# Altium footprint library Borisov.pcblib: 48 footprints (part 2 of 3)
Each footprint in its own frame and in the unit in brackets; x right, y up, seen from the top. Pads: shape width x height; smd on the part's side, far side on the other; paste and mask are expansions set on the pad; w line width, h text height; cw(c..) or ccw(c..) is an arc to the next point about the centre after c.
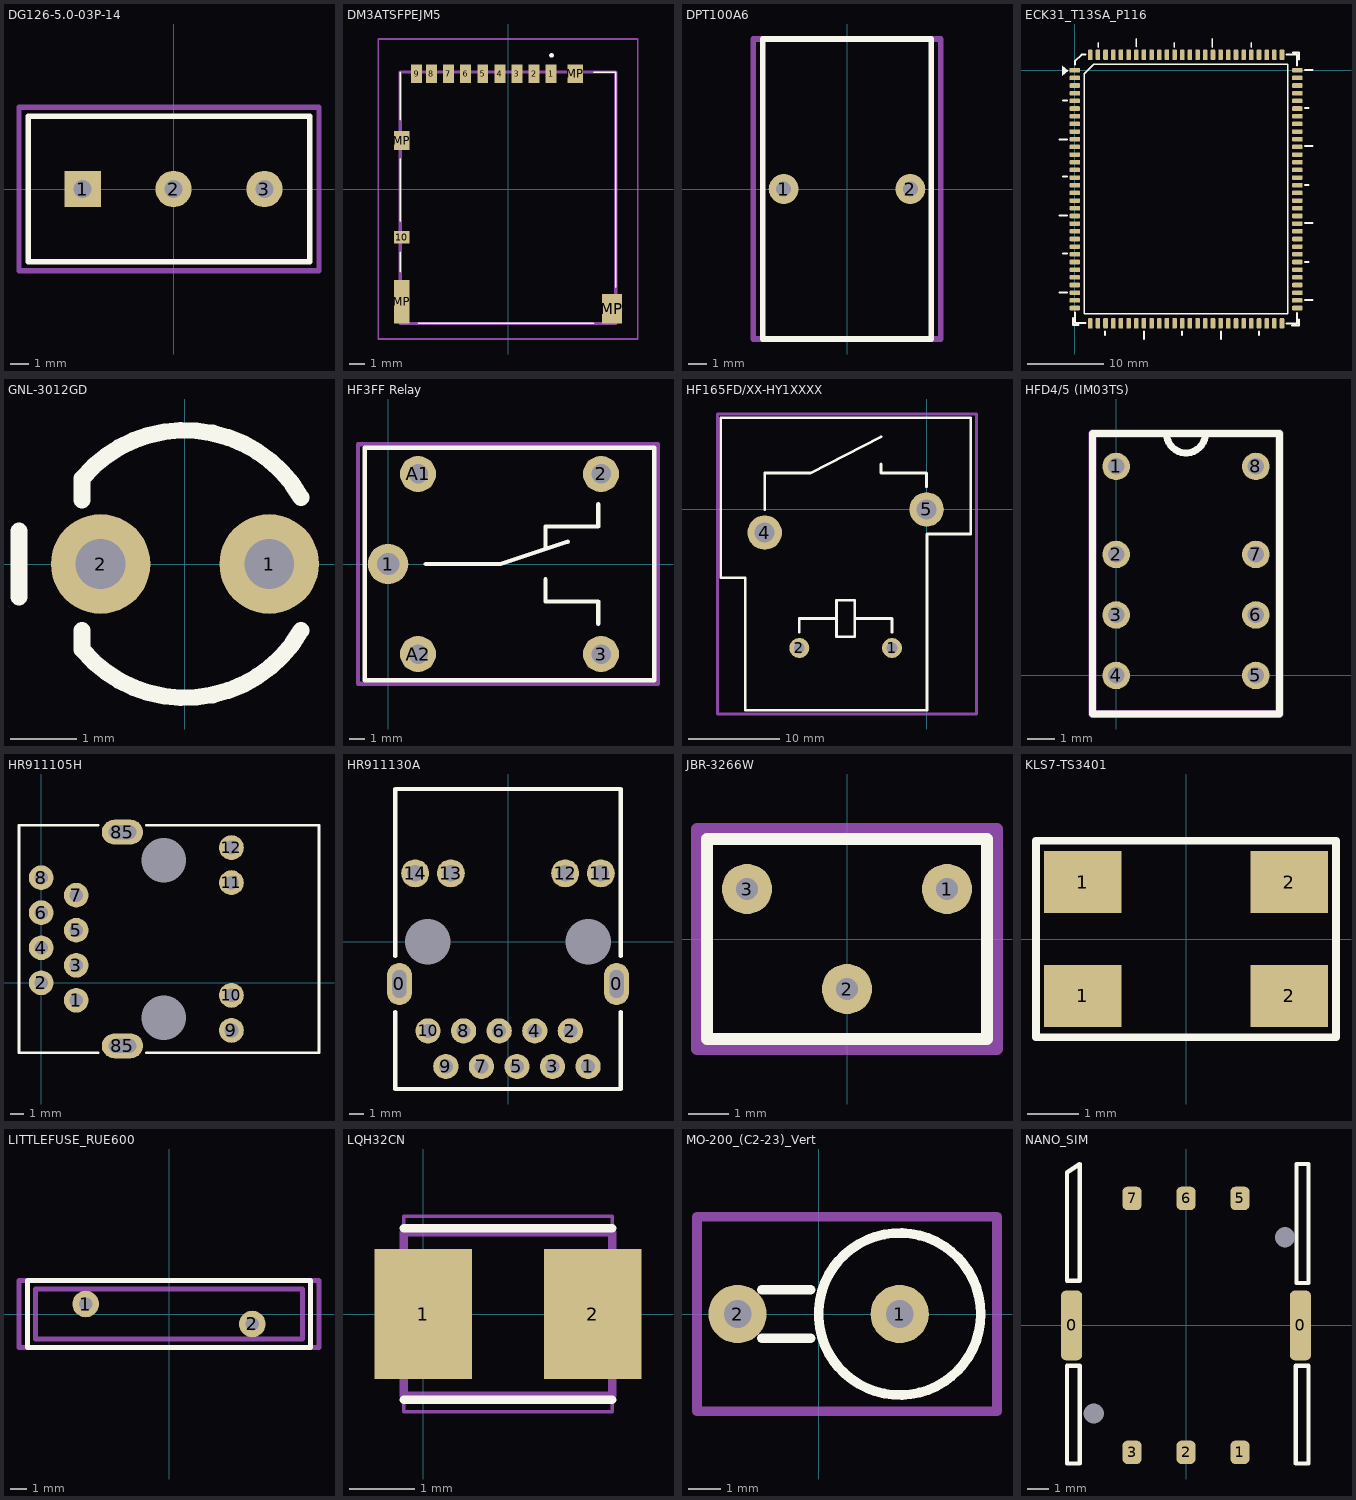
[diagram p1: the footprints below, top view; thin cyan lines are the x and y axes]

## DG126-5.0-03P-14 [mm]
pads (3):
  rect 2x2 hole 1: 1(-5,0)
  round 2 hole 1: 2(0,0) 3(5,0)
Top Overlay:
  lines w0.3: -8,-4 7.5,-4 7.5,4 -8,4 -8,-4
Board:
  lines w0.3: -8.5,-4.5 8,-4.5 8,4.5 -8.5,4.5 -8.5,-4.5
3D body "DG126-5.0-03P-14.step": height 10.2, standoff -2.5, extent -7.9,-3.9 7.5,3.9

## DM3ATSFPEJM5 [mm]
pads (14):
  rect 0.7x1.2 smd: 1(2.775,7.412) 2(1.675,7.412) 3(0.575,7.412) 4(-0.525,7.412) 5(-1.625,7.412) 6(-2.725,7.412) 7(-3.825,7.412) 8(-4.925,7.412) 9(-5.875,7.412)
  rect 1x0.8 smd: 10(-6.825,-3.087)
  rect 1x2.8 smd: MP(-6.825,-7.237)
  rect 1x1.2 smd: MP(-6.825,3.112) MP(4.325,7.412)
  rect 1.3x1.9 smd: MP(6.675,-7.688)
Top Overlay:
  lines w0.1: -6.925,-5.313 -6.925,-4.063 ; -6.925,-2.063 -6.925,1.938 ; -6.925,4.438 -6.925,7.512 ; -5.75,-8.637 5.5,-8.637 ; 5.5,7.512 6.925,7.512 6.925,-6.313
  lines w0.2: 2.8,8.537 cw(c2.8,8.587) 2.8,8.637 ; 2.8,8.537 ccw(c2.8,8.587) 2.8,8.637 ; 2.8,8.537 cw(c2.8,8.587) 2.8,8.637
Mechanical 13:
  lines w0.2: -6.925,-8.637 6.925,-8.637 6.925,7.512 -6.925,7.512 -6.925,-8.637
Mechanical 15:
  lines w0.1: -8.325,-9.637 8.325,-9.637 8.325,9.637 -8.325,9.637 -8.325,-9.637
3D body "DM3AT-SF-PEJM5.stp": height 1.68, standoff 0, extent -6.975,-8.645 6.974,7.505

## DPT100A6 [mm] "Дроссель помехоподавляющий 100мкГн 6A 65 мОм"
pads (2):
  round 1.6 hole 0.8: 1(-3.375,0) 2(3.375,0)
Top Overlay:
  lines w0.3: -4.5,-8 -4.5,8 4.5,8 4.5,-8 -4.5,-8
Board:
  lines w0.3: -5,-8 -5,8 5,8 5,-8 -5,-8
Mechanical 15:
  lines w0.3: -5,-8 -5,8 5,8 5,-8 -5,-8
3D body "DPT100A6.step": height 15.19, standoff -4, extent -3.749,-7.733 3.749,7.735

## ECK31_T13SA_P116 [mm]
pads (116):
  rect 1.4x0.6 smd: 1(0,0)
  rrect50% 1.4x0.6 smd: 2(0,-1) 3(0,-2) 4(0,-3) 5(0,-4) 6(0,-5) 7(0,-6) 8(0,-7) 9(0,-8) 10(0,-9) 11(0,-10) 12(0,-11) 13(0,-12) 14(0,-13) 15(0,-14) 16(0,-15) 17(0,-16) 18(0,-17) 19(0,-18) 20(0,-19) 21(0,-20) 22(0,-21) 23(0,-22) 24(0,-23) 25(0,-24) 26(0,-25) 27(0,-26) 28(0,-27) 29(0,-28) 30(0,-29) 31(0,-30) 32(0,-31) 59(29,-31) 60(29,-30) 61(29,-29) 62(29,-28) 63(29,-27) 64(29,-26) 65(29,-25) 66(29,-24) 67(29,-23) 68(29,-22) 69(29,-21) 70(29,-20) 71(29,-19) 72(29,-18) 73(29,-17) 74(29,-16) 75(29,-15) 76(29,-14) 77(29,-13) 78(29,-12) 79(29,-11) 80(29,-10) 81(29,-9) 82(29,-8) 83(29,-7) 84(29,-6) 85(29,-5) 86(29,-4) 87(29,-3) 88(29,-2) 89(29,-1) 90(29,0)
  rrect50% 0.6x1.4 smd: 33(2,-33) 34(3,-33) 35(4,-33) 36(5,-33) 37(6,-33) 38(7,-33) 39(8,-33) 40(9,-33) 41(10,-33) 42(11,-33) 43(12,-33) 44(13,-33) 45(14,-33) 46(15,-33) 47(16,-33) 48(17,-33) 49(18,-33) 50(19,-33) 51(20,-33) 52(21,-33) 53(22,-33) 54(23,-33) 55(24,-33) 56(25,-33) 57(26,-33) 58(27,-33) 91(27,2) 92(26,2) 93(25,2) 94(24,2) 95(23,2) 96(22,2) 97(21,2) 98(20,2) 99(19,2) 100(18,2) 101(17,2) 102(16,2) 103(15,2) 104(14,2) 105(13,2) 106(12,2) 107(11,2) 108(10,2) 109(9,2) 110(8,2) 111(7,2) 112(6,2) 113(5,2) 114(4,2) 115(3,2) 116(2,2)
Top Overlay:
  region: -0.889,-0.064 -1.651,0.572 -1.651,-0.699
  lines w0.2: 1.235,-31.765 27.765,-31.765 27.765,0.765 2.47,0.765 1.235,-0.47 1.235,-31.765
  lines w0.254: -2.016,-28.956 -1.016,-28.956 ; -2.016,-18.923 -1.016,-18.923 ; -2.016,-9.017 -1.016,-9.017 ; -1.516,-23.876 -1.016,-23.876 ; -1.516,-13.843 -1.016,-13.843 ; -1.516,-3.937 -1.016,-3.937 ; -0.254,-32.322 -0.254,-33.21 0.508,-33.21 ; 0,-31.559 0,-32.956 1.397,-32.956 ; 0,0.762 0,1.016 0,1.143 0.889,2.032 1.397,2.032 ; 3.048,3.048 3.048,3.548 ; 3.937,-34.536 3.937,-34.036 ; 8.001,3.064 8.001,4.064 ; 9.017,-35.036 9.017,-34.036 ; 12.954,3.048 12.954,3.548 ; 13.97,-34.536 13.97,-34.036 ; 17.907,3.048 17.907,4.048 ; 19.05,-35.036 19.05,-34.036 ; 22.987,3.048 22.987,3.548 ; 24.003,-34.536 24.003,-34.036 ; 27.559,-33.02 28.956,-33.02 28.956,-31.623 ; 27.559,2.032 28.956,2.032 28.956,0.635 ; 28.321,-33.274 29.21,-33.274 29.21,-32.512 ; 28.448,2.286 29.21,2.286 29.21,1.397 ; 29.972,-25.019 30.472,-25.019 ; 29.972,-19.939 30.972,-19.939 ; 29.972,-14.986 30.472,-14.986 ; 29.972,-9.906 30.972,-9.906 ; 29.972,-4.953 30.472,-4.953 ; 29.988,-29.972 30.988,-29.972 ; 29.988,0 30.988,0
3D body "ECK31-T13SA_P116.step": height 3, standoff 0, extent 0,-33 29,2

## GNL-3012GD [mm] "Светодиод зеленый 60° d=3мм 5-10мКд 565нМ (Green)"
pads (2):
  round 1.5 hole 0.75: 1(1.27,0) 2(-1.27,0)
Top Overlay:
  lines w0.254: -2.5,-0.5 -2.5,0.5 ; -1.548,-1 -1.548,-1.29 ccw(c0,0) 1.75,-1 ; -1.548,0.96 -1.548,1.25 ; -1.548,1.29 cw(c0,0) 1.75,1
3D body "GNL-3012GD.step": height 6.02, standoff -4, extent -1.52,-1.95 1.95,1.95

## HF3FF Relay [mm]
pads (5):
  round 2.7 hole 1.5: 1(0,0)
  round 2.4 hole 1.3: 2(14.2,6) 3(14.2,-6) A1(2,6) A2(2,-6)
Top Overlay:
  lines w0.3: 2.5,0 7.5,0 12,1.5 ; 10.5,-1 10.5,-2.5 14,-2.5 14,-4 ; 10.5,1 10.5,2.5 14,2.5 14,4 ; -1.55,-7.75 -1.55,7.75 17.75,7.75 17.75,-7.75 -1.55,-7.75
Bottom Overlay:
  lines w0.3: 2.5,0 7.5,0 12,1.5 ; 10.5,-1 10.5,-2.5 14,-2.5 14,-4 ; 10.5,1 10.5,2.5 14,2.5 14,4
Board:
  lines w0.3: -2,-8 18,-8 18,8 -2,8 -2,-8
3D body "HF3FF.step": height 15.5, standoff -3.5, extent -1.4,-7.6 17.6,7.6

## HF165FD/XX-HY1XXXX [mm]
pads (4):
  round 2.2 hole 1.2: 1(-3.8,-15.24) 2(-14,-15.24)
  round 3.8 hole 2.2: 4(-17.8,-2.54) 5(0,0)
Top Overlay:
  lines w0.3: -17.8,0 -17.8,4 -12.8,4 -5,8 ; -14,-13.5 -14,-12 -9.9,-12 ; -7.9,-12 -3.8,-12 -3.8,-13.5 ; -5,5 -5,4 0,4 0,2.5 ; -22.65,-7.5 -19.95,-7.5 -19.95,-22.1 0.05,-22.1 0.05,-2.7 4.85,-2.7 4.85,10.1 -22.65,10.1 -22.65,-7.5 ; -9.9,-14 -9.9,-10 -7.9,-10 -7.9,-14 -9.9,-14
Bottom Overlay:
  lines w0.3: -17.8,0 -17.8,4 -12.8,4 -5,8 ; -14,-13.5 -14,-12 -9.9,-12 ; -7.9,-12 -3.8,-12 -3.8,-13.5 ; -5,5 -5,4 0,4 0,2.5 ; -9.9,-14 -9.9,-10 -7.9,-10 -7.9,-14 -9.9,-14
Board:
  lines w0.3: -23,-22.5 -23,10.5 5.5,10.5 5.5,-22.5 -23,-22.5
3D body "HF165FD_XX-HY1XXXX.step": height 20.5, standoff -3.3, extent -22.65,-22.1 4.85,10.1

## HFD4/5 (IM03TS) [mm] "HFD4/5 (IM03TS) (1-1462037-8), Реле 2 переключ. 5VDC, 2A/250VAC DPDT"
pads (8):
  round 1 hole 0.6: 1(0,7.6) 2(0,4.4) 3(0,2.2) 4(0,0) 5(5.08,0) 6(5.08,2.2) 7(5.08,4.4) 8(5.08,7.6)
Top Overlay:
  lines w0.254: -0.86,-1.4 -0.86,8.8 ; -0.8,-1.4 5.94,-1.4 5.94,8.8 -0.8,8.8 ; 1.833,8.8 ccw(c2.54,8.8) 3.247,8.8
Board:
  lines w0.3: -0.86,-1.4 5.94,-1.4 5.94,8.8 -0.86,8.8 -0.86,-1.4
3D body "User Library-L10,1_B06,1_H05,9_A02,20.STEP": height 5.4, standoff -3.45, extent -0.5,-1.2 5.5,8.8

## HR911105H [mm] "Single port RJ-45 connector with integrated magnetics"
pads (16):
  round 1.8 hole 1: 1(2.54,-1.27) 2(0,0) 3(2.54,1.27) 4(0,2.54) 5(2.54,3.81) 6(0,5.08) 7(2.54,6.35) 8(0,7.62) 9(13.79,-3.45) 10(13.79,-0.91) 11(13.79,7.26) 12(13.79,9.8)
  round 0 hole 3.25: 82(8.89,-2.54) 82(8.89,8.89)
  oval 3x1.8 hole 1 slot 2 at 0 deg: 85(5.89,-4.575) 85(5.89,10.925)
Top Overlay:
  lines w0.2: 4.14,-5.075 -1.61,-5.075 -1.61,11.425 4.14,11.425 ; 7.64,-5.075 20.14,-5.075 20.14,11.425 7.64,11.425
3D body "User Library-HR911105A.step": height 15, standoff -1.5, extent -1.51,-4.765 19.89,11.115

## HR911130A [mm] "Single port RJ-45 connector with integrated magnetics"
pads (18):
  oval 1.8x3 hole 1 slot 2 at 90 deg: 0(-7.75,-3) 0(7.75,-3)
  round 1.8 hole 1: 1(5.72,-8.89) 2(4.45,-6.35) 3(3.18,-8.89) 4(1.91,-6.35) 5(0.64,-8.89) 6(-0.63,-6.35) 7(-1.9,-8.89) 8(-3.17,-6.35) 9(-4.44,-8.89) 10(-5.71,-6.35)
  round 2 hole 1.2: 11(6.625,4.9) 12(4.085,4.9) 13(-4.085,4.9) 14(-6.625,4.9)
  round 0 hole 3.25: 82(-5.715,0) 82(5.715,0)
Top Overlay:
  lines w0.3: -8.05,-5 -8.05,-10.5 8.05,-10.5 8.05,-5 ; -8.05,-1 -8.05,10.92 8.05,10.92 8.05,-1
3D body "HR911130A.stp": height 13.5, standoff -3, extent -7.93,-10.5 7.95,10.9

## JBR-3266W [mm]
pads (3):
  round 1.254 hole 0.55: 1(2.5,1.25) 2(0,-1.25) 3(-2.5,1.25)
Top Overlay:
  lines w0.3: -3.5,-2.5 3.5,-2.5 3.5,2.5 -3.5,2.5 -3.5,-2.5
Board:
  lines w0.3: -3.75,-2.75 -3.75,2.75 3.75,2.75 3.75,-2.75 -3.75,-2.75
Mechanical 15:
  lines w0.3: -3.75,-2.75 3.75,-2.75 3.75,2.75 -3.75,2.75 -3.75,-2.75
3D body "JBR-3266W.step": height 8.3, standoff -4, extent -3.4,-2.35 3.4,2.35

## KLS7-TS3401 [mm]
pads (4):
  rect 1.5x1.2 smd: 1(-2,-1.1) 1(-2,1.1) 2(2,-1.1) 2(2,1.1)
Top Overlay:
  lines w0.15: -2.9,-1.9 2.9,-1.9 2.9,1.9 -2.9,1.9 -2.9,-1.9
3D body "KLS7-TS3401.step": height 2.5, standoff -0.02, extent -2.325,-1.65 2.32,1.65

## LITTLEFUSE_RUE600 [mm] "RUEF600, Самовосстанавливающийся предохранитель PTC 6A(hold) 12A(trip) 30V 100A 3.5W 16s 0.005Ohm Radial 16.5 X 3 X 24.1mm Bag"
pads (2):
  round 1.6 hole 0.8: 1(-5,0.6) 2(5,-0.6)
Top Overlay:
  lines w0.3: -8.5,-2 8.5,-2 8.5,2 -8.5,2 -8.5,-2
Board:
  lines w0.3: -8,-1.5 8,-1.5 8,1.5 -8,1.5 -8,-1.5
Mechanical 15:
  lines w0.3: -9,-2 -9,2 9,2 9,-2 -9,-2
3D body "RUE600.step": height 22.5, standoff -3.5, extent -8,-1.1 8,1.1

## LQH32CN [mm] "LQH32CN4R7M, 4.7мкГн, 1210, 20%, Индуктивность SMD"
pads (2):
  rect 1.5x2 smd: 1(0,0) 2(2.6,0)
Top Overlay:
  lines w0.127: -0.3,-1.314 2.9,-1.313 ; -0.3,1.314 2.9,1.314
Mechanical 13:
  lines w0.127: -0.3,-1.25 -0.3,1.25 2.9,1.25 2.9,-1.25 -0.3,-1.25
Mechanical 15:
  lines w0.05: -0.3,-1.5 -0.3,1.5 2.9,1.5 2.9,-1.5 -0.3,-1.5
3D body "LQH32CN4R7M33L.STEP": height 2.2, standoff 0, extent -0.3,-1.25 2.9,1.25

## MO-200_(C2-23)_Vert [mm]
pads (2):
  round 1.8 hole 0.85: 1(2.5,0) 2(-2.5,0)
Top Overlay:
  circle w0.3: c2.5,0 r2.5
  lines w0.3: -1.75,-0.75 -0.25,-0.75 ; -1.75,0.75 -0.25,0.75
Board:
  lines w0.3: -3.75,-3 5.5,-3 5.5,3 -3.75,3 -3.75,-3
Mechanical 15:
  lines w0.3: -3.75,-3 -3.75,3 5.5,3 5.5,-3 -3.75,-3
3D body "MO-200_(С2-23)_Vert.step": height 19.4, standoff -3, extent -2.9,-2.5 5,2.5

## NANO_SIM [mm] "Разъем: для карт памяти; Nano SIM; SMT; PIN: 6"
pads (10):
  rrect50% 1x3.29 smd: 0(-5.385,0) 0(5.385,0)
  rrect50% 0.9x1.1 smd: 1(2.54,-5.97) 2(0,-5.97) 3(-2.54,-5.97) 5(2.54,5.98) 6(0,5.98) 7(-2.54,5.98)
  round 0 hole 0.95: 9(-4.34,-4.15) 9(4.66,4.15)
Top Overlay:
  lines w0.2: 5.485,2 5.2,2 ; 5.2,2 5.2,7.6 5.77,7.6 5.77,2 5.2,2 ; -5.6,-6.5 -5,-6.5 -5,-1.9 -5.6,-1.9 -5.6,-6.5 ; -5.6,2.1 -5.6,7.2 -5,7.6 -5,2.1 -5.6,2.1 ; 5.17,-6.5 5.77,-6.5 5.77,-1.9 5.17,-1.9 5.17,-6.5
3D body "SIM8050-6-0-14-01-A.stp": height 1.35, standoff -0.4, extent -5.42,-6.05 5.42,6.15